# Altium footprint library LimeMicroAltiumLib.PcbLib: 876 footprints (part 15 of 57)
Each footprint in its own frame and in the unit in brackets; x right, y up, seen from the top. Pads: shape width x height; smd on the part's side, far side on the other; paste and mask are expansions set on the pad; w line width, h text height; cw(c..) or ccw(c..) is an arc to the next point about the centre after c.
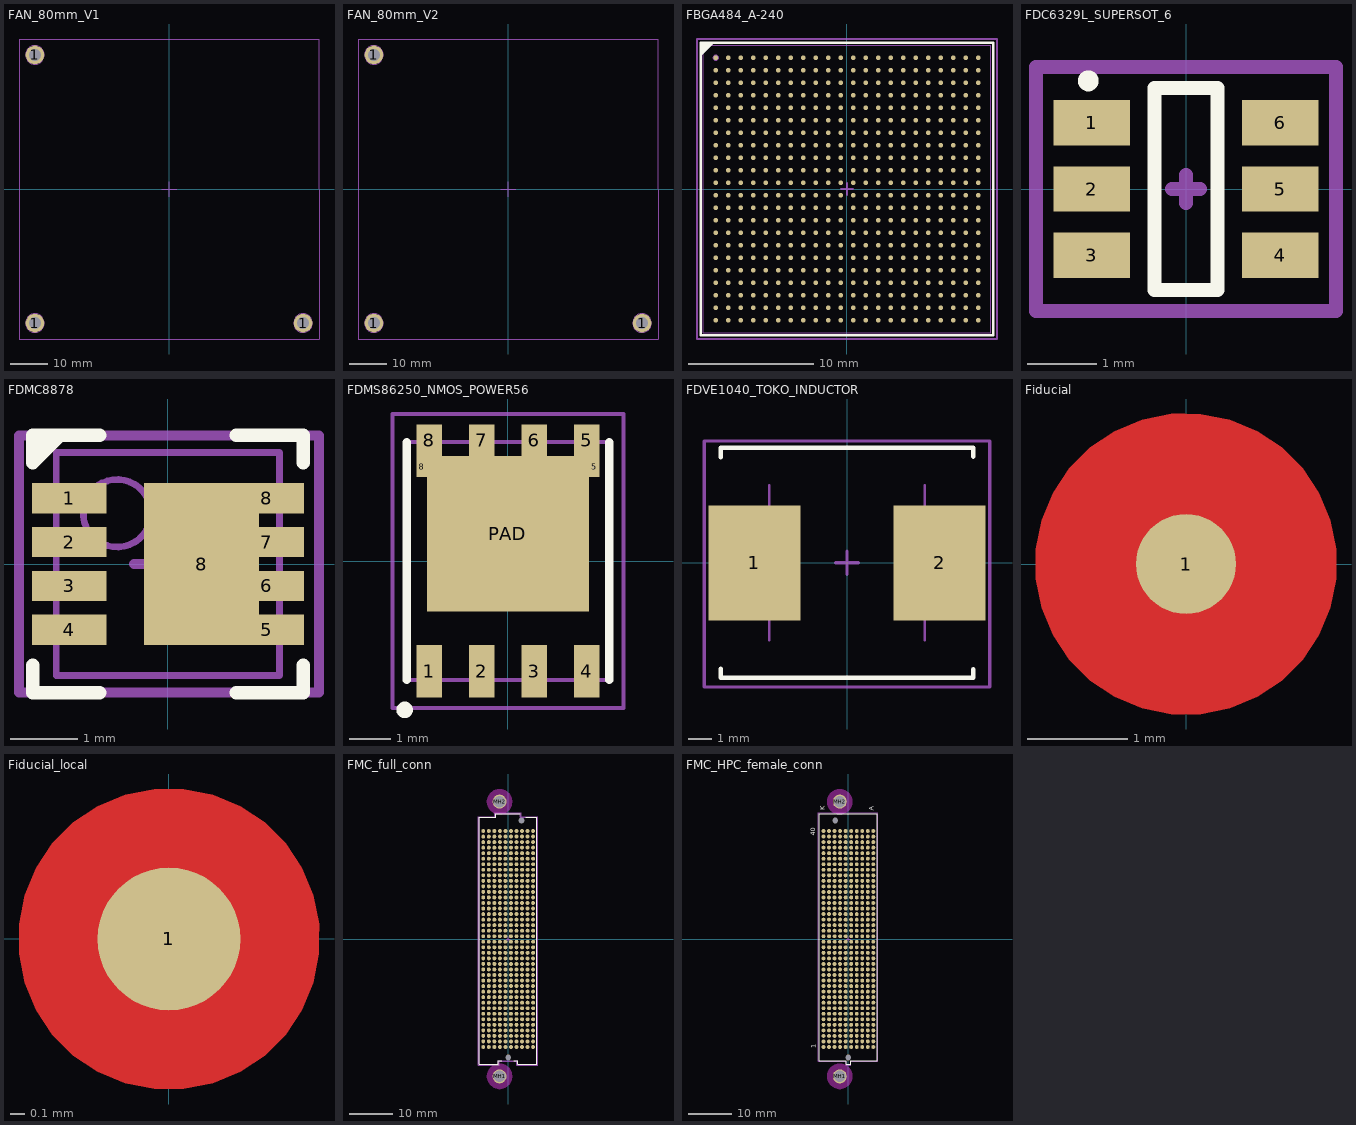
[diagram p14: the footprints below, top view; thin cyan lines are the x and y axes]

## FAN_80mm_V1 [mm]
height 20
pads (3):
  round 5 hole 3.2 mask+0.05: 1(-35.75,-35.75) 1(-35.75,35.75) 1(35.75,-35.75)
Mechanical 1:
  circle w0.25: c35.75,-35.75 r1.6
  circle w0.25: c35.75,-35.75 r2.5
  circle w0.25: c-35.75,35.75 r1.6
  circle w0.25: c-35.75,35.75 r2.5
  circle w0.25: c-35.75,-35.75 r2.5
  circle w0.25: c-35.75,-35.75 r1.6
Mechanical 15:
  circle w0.25: c-35.75,-35.75 r2.5
  circle w0.25: c-35.75,-35.75 r1.6
  circle w0.25: c-35.75,35.75 r2.5
  circle w0.25: c-35.75,35.75 r1.6
  circle w0.25: c35.75,-35.75 r2.5
  circle w0.25: c35.75,-35.75 r1.6
  lines w0.15: -2,0 0,0 ; 0,-2 0,0 ; 0,2 0,0 ; 2,0 0,0
  lines w0.3: -40,-40 -40,40 40,40 40,-40 -40,-40
  text ".Designator" at 0,0 h0.55
  text "FAN" at -3,-38 h1.5
3D body: height 15, standoff 0, extent 33.75,-37.75 37.75,-33.75
3D body: height 15, standoff 0, extent -37.75,-37.75 -33.75,-33.75
3D body: height 15, standoff 0, extent -37.75,33.75 -33.75,37.75
3D body "fan_me80201v3-000u-a99.stp": height 30, standoff 10, extent -66.338,-40 40,40

## FAN_80mm_V2 [mm]
height 20
pads (3):
  round 5 hole 3.2 mask+0.05: 1(-35.75,-35.75) 1(-35.75,35.75) 1(35.75,-35.75)
Mechanical 1:
  circle w0.25: c-35.75,-35.75 r1.6
  circle w0.25: c-35.75,-35.75 r2.5
  circle w0.25: c-35.75,35.75 r2.5
  circle w0.25: c-35.75,35.75 r1.6
  circle w0.25: c35.75,-35.75 r2.5
  circle w0.25: c35.75,-35.75 r1.6
Mechanical 15:
  circle w0.25: c35.75,-35.75 r1.6
  circle w0.25: c35.75,-35.75 r2.5
  circle w0.25: c-35.75,35.75 r1.6
  circle w0.25: c-35.75,35.75 r2.5
  circle w0.25: c-35.75,-35.75 r1.6
  circle w0.25: c-35.75,-35.75 r2.5
  lines w0.15: -2,0 0,0 ; 0,-2 0,0 ; 0,2 0,0 ; 2,0 0,0
  lines w0.3: -40,-40 40,-40 40,40 -40,40 -40,-40
  text "FAN" at -3,-38 h1.5
  text ".Designator" at 0,0 h0.55
3D body "fan_me80201v3-000u-a99.stp": height 36, standoff 16, extent -66.338,-40 40,40
3D body: height 15, standoff 0, extent -37.75,33.75 -33.75,37.75
3D body: height 15, standoff 0, extent -37.75,-37.75 -33.75,-33.75
3D body: height 15, standoff 0, extent 33.75,-37.75 37.75,-33.75

## FBGA484_A-240 [mm] "BGA, 484-Leads, Body 23x23mm, Pitch 1mm"
height 2.4
pads (484):
  round 0.38 smd: A1(-10.5,10.5) A2(-9.5,10.5) A3(-8.5,10.5) A4(-7.5,10.5) A5(-6.5,10.5) A6(-5.5,10.5) A7(-4.5,10.5) A8(-3.5,10.5) A9(-2.5,10.5) A10(-1.5,10.5) A11(-0.5,10.5) A12(0.5,10.5) A13(1.5,10.5) A14(2.5,10.5) A15(3.5,10.5) A16(4.5,10.5) A17(5.5,10.5) A18(6.5,10.5) A19(7.5,10.5) A20(8.5,10.5) A21(9.5,10.5) A22(10.5,10.5) AA1(-10.5,-9.5) AA2(-9.5,-9.5) AA3(-8.5,-9.5) AA4(-7.5,-9.5) AA5(-6.5,-9.5) AA6(-5.5,-9.5) AA7(-4.5,-9.5) AA8(-3.5,-9.5) AA9(-2.5,-9.5) AA10(-1.5,-9.5) AA11(-0.5,-9.5) AA12(0.5,-9.5) AA13(1.5,-9.5) AA14(2.5,-9.5) AA15(3.5,-9.5) AA16(4.5,-9.5) AA17(5.5,-9.5) AA18(6.5,-9.5) AA19(7.5,-9.5) AA20(8.5,-9.5) AA21(9.5,-9.5) AA22(10.5,-9.5) AB1(-10.5,-10.5) AB2(-9.5,-10.5) AB3(-8.5,-10.5) AB4(-7.5,-10.5) AB5(-6.5,-10.5) AB6(-5.5,-10.5) AB7(-4.5,-10.5) AB8(-3.5,-10.5) AB9(-2.5,-10.5) AB10(-1.5,-10.5) AB11(-0.5,-10.5) AB12(0.5,-10.5) AB13(1.5,-10.5) AB14(2.5,-10.5) AB15(3.5,-10.5) AB16(4.5,-10.5) AB17(5.5,-10.5) AB18(6.5,-10.5) AB19(7.5,-10.5) AB20(8.5,-10.5) AB21(9.5,-10.5) AB22(10.5,-10.5) B1(-10.5,9.5) B2(-9.5,9.5) B3(-8.5,9.5) B4(-7.5,9.5) B5(-6.5,9.5) B6(-5.5,9.5) B7(-4.5,9.5) B8(-3.5,9.5) B9(-2.5,9.5) B10(-1.5,9.5) B11(-0.5,9.5) B12(0.5,9.5) B13(1.5,9.5) B14(2.5,9.5) B15(3.5,9.5) B16(4.5,9.5) B17(5.5,9.5) B18(6.5,9.5) B19(7.5,9.5) B20(8.5,9.5) B21(9.5,9.5) B22(10.5,9.5) C1(-10.5,8.5) C2(-9.5,8.5) C3(-8.5,8.5) C4(-7.5,8.5) C5(-6.5,8.5) C6(-5.5,8.5) C7(-4.5,8.5) C8(-3.5,8.5) C9(-2.5,8.5) C10(-1.5,8.5) C11(-0.5,8.5) C12(0.5,8.5) C13(1.5,8.5) C14(2.5,8.5) C15(3.5,8.5) C16(4.5,8.5) C17(5.5,8.5) C18(6.5,8.5) C19(7.5,8.5) C20(8.5,8.5) C21(9.5,8.5) C22(10.5,8.5) D1(-10.5,7.5) D2(-9.5,7.5) D3(-8.5,7.5) D4(-7.5,7.5) D5(-6.5,7.5) D6(-5.5,7.5) D7(-4.5,7.5) D8(-3.5,7.5) D9(-2.5,7.5) D10(-1.5,7.5) D11(-0.5,7.5) D12(0.5,7.5) D13(1.5,7.5) D14(2.5,7.5) D15(3.5,7.5) D16(4.5,7.5) D17(5.5,7.5) D18(6.5,7.5) D19(7.5,7.5) D20(8.5,7.5) D21(9.5,7.5) D22(10.5,7.5) E1(-10.5,6.5) E2(-9.5,6.5) E3(-8.5,6.5) E4(-7.5,6.5) E5(-6.5,6.5) E6(-5.5,6.5) E7(-4.5,6.5) E8(-3.5,6.5) E9(-2.5,6.5) E10(-1.5,6.5) E11(-0.5,6.5) E12(0.5,6.5) E13(1.5,6.5) E14(2.5,6.5) E15(3.5,6.5) E16(4.5,6.5) E17(5.5,6.5) E18(6.5,6.5) E19(7.5,6.5) E20(8.5,6.5) E21(9.5,6.5) E22(10.5,6.5) F1(-10.5,5.5) F2(-9.5,5.5) F3(-8.5,5.5) F4(-7.5,5.5) F5(-6.5,5.5) F6(-5.5,5.5) F7(-4.5,5.5) F8(-3.5,5.5) F9(-2.5,5.5) F10(-1.5,5.5) F11(-0.5,5.5) F12(0.5,5.5) F13(1.5,5.5) F14(2.5,5.5) F15(3.5,5.5) F16(4.5,5.5) F17(5.5,5.5) F18(6.5,5.5) F19(7.5,5.5) F20(8.5,5.5) F21(9.5,5.5) F22(10.5,5.5) G1(-10.5,4.5) G2(-9.5,4.5) G3(-8.5,4.5) G4(-7.5,4.5) G5(-6.5,4.5) G6(-5.5,4.5) G7(-4.5,4.5) G8(-3.5,4.5) G9(-2.5,4.5) G10(-1.5,4.5) G11(-0.5,4.5) G12(0.5,4.5) G13(1.5,4.5) G14(2.5,4.5) G15(3.5,4.5) G16(4.5,4.5) G17(5.5,4.5) G18(6.5,4.5) G19(7.5,4.5) G20(8.5,4.5) G21(9.5,4.5) G22(10.5,4.5) H1(-10.5,3.5) H2(-9.5,3.5) H3(-8.5,3.5) H4(-7.5,3.5) H5(-6.5,3.5) H6(-5.5,3.5) H7(-4.5,3.5) H8(-3.5,3.5) H9(-2.5,3.5) H10(-1.5,3.5) H11(-0.5,3.5) H12(0.5,3.5) H13(1.5,3.5) H14(2.5,3.5) H15(3.5,3.5) H16(4.5,3.5) H17(5.5,3.5) H18(6.5,3.5) H19(7.5,3.5) H20(8.5,3.5) H21(9.5,3.5) H22(10.5,3.5) J1(-10.5,2.5) J2(-9.5,2.5) J3(-8.5,2.5) J4(-7.5,2.5) J5(-6.5,2.5) J6(-5.5,2.5) J7(-4.5,2.5) J8(-3.5,2.5) J9(-2.5,2.5) J10(-1.5,2.5) J11(-0.5,2.5) J12(0.5,2.5) J13(1.5,2.5) J14(2.5,2.5) J15(3.5,2.5) J16(4.5,2.5) J17(5.5,2.5) J18(6.5,2.5) J19(7.5,2.5) J20(8.5,2.5) J21(9.5,2.5) J22(10.5,2.5) K1(-10.5,1.5) K2(-9.5,1.5) K3(-8.5,1.5) K4(-7.5,1.5) K5(-6.5,1.5) K6(-5.5,1.5) K7(-4.5,1.5) K8(-3.5,1.5) K9(-2.5,1.5) K10(-1.5,1.5) K11(-0.5,1.5) K12(0.5,1.5) K13(1.5,1.5) K14(2.5,1.5) K15(3.5,1.5) K16(4.5,1.5) K17(5.5,1.5) K18(6.5,1.5) K19(7.5,1.5) K20(8.5,1.5) K21(9.5,1.5) K22(10.5,1.5) L1(-10.5,0.5) L2(-9.5,0.5) L3(-8.5,0.5) L4(-7.5,0.5) L5(-6.5,0.5) L6(-5.5,0.5) L7(-4.5,0.5) L8(-3.5,0.5) L9(-2.5,0.5) L10(-1.5,0.5) L11(-0.5,0.5) L12(0.5,0.5) L13(1.5,0.5) L14(2.5,0.5) L15(3.5,0.5) L16(4.5,0.5) L17(5.5,0.5) L18(6.5,0.5) L19(7.5,0.5) L20(8.5,0.5) L21(9.5,0.5) L22(10.5,0.5) M1(-10.5,-0.5) M2(-9.5,-0.5) M3(-8.5,-0.5) M4(-7.5,-0.5) M5(-6.5,-0.5) M6(-5.5,-0.5) M7(-4.5,-0.5) M8(-3.5,-0.5) M9(-2.5,-0.5) M10(-1.5,-0.5) M11(-0.5,-0.5) M12(0.5,-0.5) M13(1.5,-0.5) M14(2.5,-0.5) M15(3.5,-0.5) M16(4.5,-0.5) M17(5.5,-0.5) M18(6.5,-0.5) M19(7.5,-0.5) M20(8.5,-0.5) M21(9.5,-0.5) M22(10.5,-0.5) N1(-10.5,-1.5) N2(-9.5,-1.5) N3(-8.5,-1.5) N4(-7.5,-1.5) N5(-6.5,-1.5) N6(-5.5,-1.5) N7(-4.5,-1.5) N8(-3.5,-1.5) N9(-2.5,-1.5) N10(-1.5,-1.5) N11(-0.5,-1.5) N12(0.5,-1.5) N13(1.5,-1.5) N14(2.5,-1.5) N15(3.5,-1.5) N16(4.5,-1.5) N17(5.5,-1.5) N18(6.5,-1.5) N19(7.5,-1.5) N20(8.5,-1.5) N21(9.5,-1.5) N22(10.5,-1.5) P1(-10.5,-2.5) P2(-9.5,-2.5) P3(-8.5,-2.5) P4(-7.5,-2.5) P5(-6.5,-2.5) P6(-5.5,-2.5) P7(-4.5,-2.5) P8(-3.5,-2.5) P9(-2.5,-2.5) P10(-1.5,-2.5) P11(-0.5,-2.5) P12(0.5,-2.5) P13(1.5,-2.5) P14(2.5,-2.5) P15(3.5,-2.5) P16(4.5,-2.5) P17(5.5,-2.5) P18(6.5,-2.5) P19(7.5,-2.5) P20(8.5,-2.5) P21(9.5,-2.5) P22(10.5,-2.5) R1(-10.5,-3.5) R2(-9.5,-3.5) R3(-8.5,-3.5) R4(-7.5,-3.5) R5(-6.5,-3.5) R6(-5.5,-3.5) R7(-4.5,-3.5) R8(-3.5,-3.5) R9(-2.5,-3.5) R10(-1.5,-3.5) R11(-0.5,-3.5) R12(0.5,-3.5) R13(1.5,-3.5) R14(2.5,-3.5) R15(3.5,-3.5) R16(4.5,-3.5) R17(5.5,-3.5) R18(6.5,-3.5) R19(7.5,-3.5) R20(8.5,-3.5) R21(9.5,-3.5) R22(10.5,-3.5) T1(-10.5,-4.5) T2(-9.5,-4.5) T3(-8.5,-4.5) T4(-7.5,-4.5) T5(-6.5,-4.5) T6(-5.5,-4.5) T7(-4.5,-4.5) T8(-3.5,-4.5) T9(-2.5,-4.5) T10(-1.5,-4.5) T11(-0.5,-4.5) T12(0.5,-4.5) T13(1.5,-4.5) T14(2.5,-4.5) T15(3.5,-4.5) T16(4.5,-4.5) T17(5.5,-4.5) T18(6.5,-4.5) T19(7.5,-4.5) T20(8.5,-4.5) T21(9.5,-4.5) T22(10.5,-4.5) U1(-10.5,-5.5) U2(-9.5,-5.5) U3(-8.5,-5.5) U4(-7.5,-5.5) U5(-6.5,-5.5) U6(-5.5,-5.5) U7(-4.5,-5.5) U8(-3.5,-5.5) U9(-2.5,-5.5) U10(-1.5,-5.5) U11(-0.5,-5.5) U12(0.5,-5.5) U13(1.5,-5.5) U14(2.5,-5.5) U15(3.5,-5.5) U16(4.5,-5.5) U17(5.5,-5.5) U18(6.5,-5.5) U19(7.5,-5.5) U20(8.5,-5.5) U21(9.5,-5.5) U22(10.5,-5.5) V1(-10.5,-6.5) V2(-9.5,-6.5) V3(-8.5,-6.5) V4(-7.5,-6.5) V5(-6.5,-6.5) V6(-5.5,-6.5) V7(-4.5,-6.5) V8(-3.5,-6.5) V9(-2.5,-6.5) V10(-1.5,-6.5) V11(-0.5,-6.5) V12(0.5,-6.5) V13(1.5,-6.5) V14(2.5,-6.5) V15(3.5,-6.5) V16(4.5,-6.5) V17(5.5,-6.5) V18(6.5,-6.5) V19(7.5,-6.5) V20(8.5,-6.5) V21(9.5,-6.5) V22(10.5,-6.5) W1(-10.5,-7.5) W2(-9.5,-7.5) W3(-8.5,-7.5) W4(-7.5,-7.5) W5(-6.5,-7.5) W6(-5.5,-7.5) W7(-4.5,-7.5) W8(-3.5,-7.5) W9(-2.5,-7.5) W10(-1.5,-7.5) W11(-0.5,-7.5) W12(0.5,-7.5) W13(1.5,-7.5) W14(2.5,-7.5) W15(3.5,-7.5) W16(4.5,-7.5) W17(5.5,-7.5) W18(6.5,-7.5) W19(7.5,-7.5) W20(8.5,-7.5) W21(9.5,-7.5) W22(10.5,-7.5) Y1(-10.5,-8.5) Y2(-9.5,-8.5) Y3(-8.5,-8.5) Y4(-7.5,-8.5) Y5(-6.5,-8.5) Y6(-5.5,-8.5) Y7(-4.5,-8.5) Y8(-3.5,-8.5) Y9(-2.5,-8.5) Y10(-1.5,-8.5) Y11(-0.5,-8.5) Y12(0.5,-8.5) Y13(1.5,-8.5) Y14(2.5,-8.5) Y15(3.5,-8.5) Y16(4.5,-8.5) Y17(5.5,-8.5) Y18(6.5,-8.5) Y19(7.5,-8.5) Y20(8.5,-8.5) Y21(9.5,-8.5) Y22(10.5,-8.5)
Top Overlay:
  region: -10.7,11.7 -11.7,10.7 -11.7,11.7
  lines w0.2: -11.7,10.7 -10.7,11.7 ; -11.7,-11.7 -11.7,11.7 11.7,11.7 11.7,-11.7 -11.7,-11.7
Mechanical 13:
  lines w0.1: -11.5,-11.5 -11.5,11.5 11.5,11.5 11.5,-11.5 -11.5,-11.5
Mechanical 15:
  circle w0.25: c-10.5,10.5 r0.125
  lines w0.15: -0.5,0 0.5,0 ; 0,-0.5 0,0.5 ; -12,-12 -12,12 12,12 12,-12 -12,-12
  text ".Designator" at 0,0 h0.7
3D body: height 2.5, standoff 2.4, extent -10.9,10.1 -10.1,10.9
3D body: height 2.4, standoff 0.4, extent -11.5,-11.5 11.5,11.5

## FDC6329L_SUPERSOT_6 [mm]
pads (6):
  rect 1.1x0.65 smd: 1(-1.35,0.95) 2(-1.35,0) 3(-1.35,-0.95) 4(1.35,-0.95) 5(1.35,0) 6(1.35,0.95)
Top Overlay:
  circle w0.254: c-1.4,1.55 r0.022
  lines w0.2: -0.45,-1.45 0.45,-1.45 0.45,1.45 -0.45,1.45 -0.45,-1.45
Mechanical 15:
  circle w0.254: c-1.36,0.96 r0.045
  lines w0.2: -0.2,0 0,0 ; 0,-0.2 0,0.2 0,0 ; 0.2,0 0,0 ; -2.15,-1.75 -2.15,1.75 2.15,1.75 2.15,-1.75 -2.15,-1.75
  text ".Designator" at 0,0 h0.55
3D body "SuperSOT-6.stp": height 1, standoff 0, extent -1.4,-1.45 1.4,1.45

## FDMC8878 [mm] "SON, 8-Leads, Body 3,30x3,30mm, Pitch 0,65mm, Thermal Pad 1,20x0,75mm, IPC Medium Density"
height 0.8
pads (9):
  rect 1.1x0.45 smd mask+0.05: 1(-1.46,0.975) 2(-1.46,0.325) 3(-1.46,-0.325) 4(-1.46,-0.975)
  rect 1.1x0.45 smd: 5(1.46,-0.975) 6(1.46,-0.325) 7(1.46,0.325) 8(1.46,0.975)
  rect 1.7x2.4 smd: 8(0.5,0)
Top Overlay:
  region: -2,1.5 -2,1.9 -1.6,1.9
  lines w0.2: -2,-1.5 -2,-1.9 -1.01,-1.9 ; -1.6,1.9 -2,1.5 -2,1.9 -1.01,1.9 ; 1.01,-1.9 2,-1.9 2,-1.5 ; 1.01,1.9 2,1.9 2,1.5
Mechanical 13:
  circle w0.1: c-0.75,0.75 r0.5
  lines w0.1: -1.65,-1.65 1.65,-1.65 1.65,1.65 -1.65,1.65 -1.65,-1.65
Mechanical 15:
  circle w0.2: c-1.475,0.975 r0.079
  lines w0.15: -0.5,0 0.5,0 ; 0,-0.5 0,0.5 ; -2.2,-1.9 2.235,-1.9 2.235,1.9 -2.2,1.9 -2.2,-1.9
  text ".Designator" at 0,0 h0.55
3D body "User Library-MLP-3_3x3_3.STEP": height 0.8, standoff 0, extent -1.65,-1.65 1.65,1.65

## FDMS86250_NMOS_POWER56 [mm]
pads (11):
  rect 0.61x1.27 smd mask+0.05: 1(-1.905,-2.67) 2(-0.635,-2.67) 3(0.635,-2.67) 4(1.905,-2.67)
  rect 0.61x0.77 smd mask+0.05: 5(1.905,2.92) 6(0.635,2.92) 7(-0.635,2.92) 8(-1.905,2.92)
  rect 0.255x0.5 smd mask+0.05: 5(2.083,2.285) 8(-2.083,2.285)
  rect 3.91x3.75 smd mask+0.05: PAD(0,0.66)
Top Overlay:
  circle w0.2: c-2.5,-3.6 r0.1
  lines w0.2: -2.45,-2.875 -2.45,2.875 ; 2.45,-2.875 2.45,2.875
Mechanical 13:
  lines w0.1: -2.45,-2.875 2.45,-2.875 2.45,2.875 -2.45,2.875 -2.45,-2.875
Mechanical 15:
  circle w0.2: c-1.9,-2.8 r0.1
  lines w0.1: -2.794,-3.556 2.794,-3.556 2.794,3.556 -2.794,3.556 -2.794,-3.556
  lines w0.15: -0.5,0 0.5,0 ; 0,-0.5 0,0.5
  text ".Designator" at 0,0 h0.55
3D body "FDMS86250.stp": height 1.2, standoff 0, extent -2.45,-3.244 2.45,3.244

## FDVE1040_TOKO_INDUCTOR [mm] "Precision Wire Wound Inductor"
height 4
pads (2):
  rect 4x5 smd: 1(-4.025,0) 2(4.025,0)
Top Overlay:
  lines w0.2: -5.5,-4.6 -5.5,-5 -5.3,-5 5.5,-5 5.5,-4.625 ; -5.5,4.6 -5.5,5 -5.3,5 5.5,5 5.5,4.625
Mechanical 13:
  lines w0.1: -3.38,-4.98 3.38,-4.98 ; -3.38,-3.38 -3.38,3.38 ; -3.38,4.98 3.38,4.98 ; 3.38,-3.38 3.38,3.38
Mechanical 15:
  lines w0.15: -0.5,0 0.5,0 ; 0,-0.5 0,0.5 ; -6.2,-5.4 -6.2,5.3 6.2,5.3 6.2,-5.4 -6.2,-5.4
  text "no polarity" at -2.9,-2.4 h0.55
  text ".Designator" at 0,0 h0.55
3D body "SW3dPS-744325120.STEP": height 4.72, standoff -0.09, extent -5.55,-5.256 5.45,5.256

## Fiducial [mm]
pads (1):
  round 1 smd paste-1 mask+1: 1(0,0)
Top Layer:
  pour cut-out: 0,1.5 -0.148,1.5 -0.438,1.442 -0.711,1.329 -0.956,1.165 -1.165,0.956 -1.329,0.711 -1.442,0.438 -1.5,0.148 -1.5,0 -1.5,-0.148 -1.442,-0.438 -1.329,-0.711 -1.165,-0.956 -0.956,-1.165 -0.711,-1.329 -0.438,-1.442 -0.148,-1.5 0,-1.5 0.148,-1.5 0.438,-1.442 0.711,-1.329 0.956,-1.165 1.165,-0.956 1.329,-0.711 1.442,-0.438 1.5,-0.148 1.5,0 1.5,0.148 1.442,0.438 1.329,0.711 1.165,0.956 0.956,1.165 0.711,1.329 0.438,1.442 0.148,1.5
Mechanical 1:
  circle w0.6: c0,0 r0.2

## Fiducial_local [mm]
pads (1):
  round 1 smd paste-1 mask+0.5: 1(0,0)
Top Layer:
  pour cut-out: -1.05,0 -1.05,-0.103 -1.01,-0.306 -0.931,-0.497 -0.816,-0.669 -0.669,-0.816 -0.497,-0.931 -0.306,-1.01 -0.103,-1.05 0,-1.05 0.103,-1.05 0.306,-1.01 0.497,-0.931 0.669,-0.816 0.816,-0.669 0.931,-0.497 1.01,-0.306 1.05,-0.103 1.05,0 1.05,0.103 1.01,0.306 0.931,0.497 0.816,0.669 0.669,0.816 0.497,0.931 0.306,1.01 0.103,1.05 0,1.05 -0.103,1.05 -0.306,1.01 -0.497,0.931 -0.669,0.816 -0.816,0.669 -0.931,0.497 -1.01,0.306 -1.05,0.103
Mechanical 1:
  circle w0.6: c0,0 r0.2

## FMC_full_conn [mm]
pads (404):
  round 0.9 smd: A1(5.715,24.765) A2(5.715,23.495) A3(5.715,22.225) A4(5.715,20.955) A5(5.715,19.685) A6(5.715,18.415) A7(5.715,17.145) A8(5.715,15.875) A9(5.715,14.605) A10(5.715,13.335) A11(5.715,12.065) A12(5.715,10.795) A13(5.715,9.525) A14(5.715,8.255) A15(5.715,6.985) A16(5.715,5.715) A17(5.715,4.445) A18(5.715,3.175) A19(5.715,1.905) A20(5.715,0.635) A21(5.715,-0.635) A22(5.715,-1.905) A23(5.715,-3.175) A24(5.715,-4.445) A25(5.715,-5.715) A26(5.715,-6.985) A27(5.715,-8.255) A28(5.715,-9.525) A29(5.715,-10.795) A30(5.715,-12.065) A31(5.715,-13.335) A32(5.715,-14.605) A33(5.715,-15.875) A34(5.715,-17.145) A35(5.715,-18.415) A36(5.715,-19.685) A37(5.715,-20.955) A38(5.715,-22.225) A39(5.715,-23.495) A40(5.715,-24.765) B1(4.445,24.765) B2(4.445,23.495) B3(4.445,22.225) B4(4.445,20.955) B5(4.445,19.685) B6(4.445,18.415) B7(4.445,17.145) B8(4.445,15.875) B9(4.445,14.605) B10(4.445,13.335) B11(4.445,12.065) B12(4.445,10.795) B13(4.445,9.525) B14(4.445,8.255) B15(4.445,6.985) B16(4.445,5.715) B17(4.445,4.445) B18(4.445,3.175) B19(4.445,1.905) B20(4.445,0.635) B21(4.445,-0.635) B22(4.445,-1.905) B23(4.445,-3.175) B24(4.445,-4.445) B25(4.445,-5.715) B26(4.445,-6.985) B27(4.445,-8.255) B28(4.445,-9.525) B29(4.445,-10.795) B30(4.445,-12.065) B31(4.445,-13.335) B32(4.445,-14.605) B33(4.445,-15.875) B34(4.445,-17.145) B35(4.445,-18.415) B36(4.445,-19.685) B37(4.445,-20.955) B38(4.445,-22.225) B39(4.445,-23.495) B40(4.445,-24.765) C1(3.175,24.765) C2(3.175,23.495) C3(3.175,22.225) C4(3.175,20.955) C5(3.175,19.685) C6(3.175,18.415) C7(3.175,17.145) C8(3.175,15.875) C9(3.175,14.605) C10(3.175,13.335) C11(3.175,12.065) C12(3.175,10.795) C13(3.175,9.525) C14(3.175,8.255) C15(3.175,6.985) C16(3.175,5.715) C17(3.175,4.445) C18(3.175,3.175) C19(3.175,1.905) C20(3.175,0.635) C21(3.175,-0.635) C22(3.175,-1.905) C23(3.175,-3.175) C24(3.175,-4.445) C25(3.175,-5.715) C26(3.175,-6.985) C27(3.175,-8.255) C28(3.175,-9.525) C29(3.175,-10.795) C30(3.175,-12.065) C31(3.175,-13.335) C32(3.175,-14.605) C33(3.175,-15.875) C34(3.175,-17.145) C35(3.175,-18.415) C36(3.175,-19.685) C37(3.175,-20.955) C38(3.175,-22.225) C39(3.175,-23.495) C40(3.175,-24.765) D1(1.905,24.765) D2(1.905,23.495) D3(1.905,22.225) D4(1.905,20.955) D5(1.905,19.685) D6(1.905,18.415) D7(1.905,17.145) D8(1.905,15.875) D9(1.905,14.605) D10(1.905,13.335) D11(1.905,12.065) D12(1.905,10.795) D13(1.905,9.525) D14(1.905,8.255) D15(1.905,6.985) D16(1.905,5.715) D17(1.905,4.445) D18(1.905,3.175) D19(1.905,1.905) D20(1.905,0.635) D21(1.905,-0.635) D22(1.905,-1.905) D23(1.905,-3.175) D24(1.905,-4.445) D25(1.905,-5.715) D26(1.905,-6.985) D27(1.905,-8.255) D28(1.905,-9.525) D29(1.905,-10.795) D30(1.905,-12.065) D31(1.905,-13.335) D32(1.905,-14.605) D33(1.905,-15.875) D34(1.905,-17.145) D35(1.905,-18.415) D36(1.905,-19.685) D37(1.905,-20.955) D38(1.905,-22.225) D39(1.905,-23.495) D40(1.905,-24.765) E1(0.635,24.765) E2(0.635,23.495) E3(0.635,22.225) E4(0.635,20.955) E5(0.635,19.685) E6(0.635,18.415) E7(0.635,17.145) E8(0.635,15.875) E9(0.635,14.605) E10(0.635,13.335) E11(0.635,12.065) E12(0.635,10.795) E13(0.635,9.525) E14(0.635,8.255) E15(0.635,6.985) E16(0.635,5.715) E17(0.635,4.445) E18(0.635,3.175) E19(0.635,1.905) E20(0.635,0.635) E21(0.635,-0.635) E22(0.635,-1.905) E23(0.635,-3.175) E24(0.635,-4.445) E25(0.635,-5.715) E26(0.635,-6.985) E27(0.635,-8.255) E28(0.635,-9.525) E29(0.635,-10.795) E30(0.635,-12.065) E31(0.635,-13.335) E32(0.635,-14.605) E33(0.635,-15.875) E34(0.635,-17.145) E35(0.635,-18.415) E36(0.635,-19.685) E37(0.635,-20.955) E38(0.635,-22.225) E39(0.635,-23.495) E40(0.635,-24.765) F1(-0.635,24.765) F2(-0.635,23.495) F3(-0.635,22.225) F4(-0.635,20.955) F5(-0.635,19.685) F6(-0.635,18.415) F7(-0.635,17.145) F8(-0.635,15.875) F9(-0.635,14.605) F10(-0.635,13.335) F11(-0.635,12.065) F12(-0.635,10.795) F13(-0.635,9.525) F14(-0.635,8.255) F15(-0.635,6.985) F16(-0.635,5.715) F17(-0.635,4.445) F18(-0.635,3.175) F19(-0.635,1.905) F20(-0.635,0.635) F21(-0.635,-0.635) F22(-0.635,-1.905) F23(-0.635,-3.175) F24(-0.635,-4.445) F25(-0.635,-5.715) F26(-0.635,-6.985) F27(-0.635,-8.255) F28(-0.635,-9.525) F29(-0.635,-10.795) F30(-0.635,-12.065) F31(-0.635,-13.335) F32(-0.635,-14.605) F33(-0.635,-15.875) F34(-0.635,-17.145) F35(-0.635,-18.415) F36(-0.635,-19.685) F37(-0.635,-20.955) F38(-0.635,-22.225) F39(-0.635,-23.495) F40(-0.635,-24.765) G1(-1.905,24.765) G2(-1.905,23.495) G3(-1.905,22.225) G4(-1.905,20.955) G5(-1.905,19.685) G6(-1.905,18.415) G7(-1.905,17.145) G8(-1.905,15.875) G9(-1.905,14.605) G10(-1.905,13.335) G11(-1.905,12.065) G12(-1.905,10.795) G13(-1.905,9.525) G14(-1.905,8.255) G15(-1.905,6.985) G16(-1.905,5.715) G17(-1.905,4.445) G18(-1.905,3.175) G19(-1.905,1.905) G20(-1.905,0.635) G21(-1.905,-0.635) G22(-1.905,-1.905) G23(-1.905,-3.175) G24(-1.905,-4.445) G25(-1.905,-5.715) G26(-1.905,-6.985) G27(-1.905,-8.255) G28(-1.905,-9.525) G29(-1.905,-10.795) G30(-1.905,-12.065) G31(-1.905,-13.335) G32(-1.905,-14.605) G33(-1.905,-15.875) G34(-1.905,-17.145) G35(-1.905,-18.415) G36(-1.905,-19.685) G37(-1.905,-20.955) G38(-1.905,-22.225) G39(-1.905,-23.495) G40(-1.905,-24.765) H1(-3.175,24.765) H2(-3.175,23.495) H3(-3.175,22.225) H4(-3.175,20.955) H5(-3.175,19.685) H6(-3.175,18.415) H7(-3.175,17.145) H8(-3.175,15.875) H9(-3.175,14.605) H10(-3.175,13.335) H11(-3.175,12.065) H12(-3.175,10.795) H13(-3.175,9.525) H14(-3.175,8.255) H15(-3.175,6.985) H16(-3.175,5.715) H17(-3.175,4.445) H18(-3.175,3.175) H19(-3.175,1.905) H20(-3.175,0.635) H21(-3.175,-0.635) H22(-3.175,-1.905) H23(-3.175,-3.175) H24(-3.175,-4.445) H25(-3.175,-5.715) H26(-3.175,-6.985) H27(-3.175,-8.255) H28(-3.175,-9.525) H29(-3.175,-10.795) H30(-3.175,-12.065) H31(-3.175,-13.335) H32(-3.175,-14.605) H33(-3.175,-15.875) H34(-3.175,-17.145) H35(-3.175,-18.415) H36(-3.175,-19.685) H37(-3.175,-20.955) H38(-3.175,-22.225) H39(-3.175,-23.495) H40(-3.175,-24.765) J1(-4.445,24.765) J2(-4.445,23.495) J3(-4.445,22.225) J4(-4.445,20.955) J5(-4.445,19.685) J6(-4.445,18.415) J7(-4.445,17.145) J8(-4.445,15.875) J9(-4.445,14.605) J10(-4.445,13.335) J11(-4.445,12.065) J12(-4.445,10.795) J13(-4.445,9.525) J14(-4.445,8.255) J15(-4.445,6.985) J16(-4.445,5.715) J17(-4.445,4.445) J18(-4.445,3.175) J19(-4.445,1.905) J20(-4.445,0.635) J21(-4.445,-0.635) J22(-4.445,-1.905) J23(-4.445,-3.175) J24(-4.445,-4.445) J25(-4.445,-5.715) J26(-4.445,-6.985) J27(-4.445,-8.255) J28(-4.445,-9.525) J29(-4.445,-10.795) J30(-4.445,-12.065) J31(-4.445,-13.335) J32(-4.445,-14.605) J33(-4.445,-15.875) J34(-4.445,-17.145) J35(-4.445,-18.415) J36(-4.445,-19.685) J37(-4.445,-20.955) J38(-4.445,-22.225) J39(-4.445,-23.495) J40(-4.445,-24.765) K1(-5.715,24.765) K2(-5.715,23.495) K3(-5.715,22.225) K4(-5.715,20.955) K5(-5.715,19.685) K6(-5.715,18.415) K7(-5.715,17.145) K8(-5.715,15.875) K9(-5.715,14.605) K10(-5.715,13.335) K11(-5.715,12.065) K12(-5.715,10.795) K13(-5.715,9.525) K14(-5.715,8.255) K15(-5.715,6.985) K16(-5.715,5.715) K17(-5.715,4.445) K18(-5.715,3.175) K19(-5.715,1.905) K20(-5.715,0.635) K21(-5.715,-0.635) K22(-5.715,-1.905) K23(-5.715,-3.175) K24(-5.715,-4.445) K25(-5.715,-5.715) K26(-5.715,-6.985) K27(-5.715,-8.255) K28(-5.715,-9.525) K29(-5.715,-10.795) K30(-5.715,-12.065) K31(-5.715,-13.335) K32(-5.715,-14.605) K33(-5.715,-15.875) K34(-5.715,-17.145) K35(-5.715,-18.415) K36(-5.715,-19.685) K37(-5.715,-20.955) K38(-5.715,-22.225) K39(-5.715,-23.495) K40(-5.715,-24.765)
  round 3.2 hole 2.7: MH1(-1.98,-31.5) MH2(-1.98,31.5)
  round 0.97 hole 1.27 unplated: MH1(0,-27.18) MH2(3.05,27.18)
Top Layer keep-out:
  region: -1.98,-34.4 -2.17,-34.4 -2.547,-34.35 -2.914,-34.252 -3.265,-34.107 -3.595,-33.916 -3.896,-33.685 -4.165,-33.416 -4.396,-33.115 -4.587,-32.785 -4.732,-32.434 -4.83,-32.067 -4.88,-31.69 -4.88,-31.5 -4.88,-31.31 -4.83,-30.933 -4.732,-30.566 -4.587,-30.215 -4.396,-29.885 -4.165,-29.584 -3.896,-29.315 -3.595,-29.084 -3.265,-28.893 -2.914,-28.748 -2.547,-28.65 -2.17,-28.6 -1.98,-28.6 -1.79,-28.6 -1.413,-28.65 -1.046,-28.748 -0.695,-28.893 -0.365,-29.084 -0.064,-29.315 0.205,-29.584 0.436,-29.885 0.627,-30.215 0.772,-30.566 0.87,-30.933 0.92,-31.31 0.92,-31.5 0.92,-31.69 0.87,-32.067 0.772,-32.434 0.627,-32.785 0.436,-33.115 0.205,-33.416 -0.064,-33.685 -0.365,-33.916 -0.695,-34.107 -1.046,-34.252 -1.413,-34.35 -1.79,-34.4
  region: -1.98,28.6 -2.17,28.6 -2.547,28.65 -2.914,28.748 -3.265,28.893 -3.595,29.084 -3.896,29.315 -4.165,29.584 -4.396,29.885 -4.587,30.215 -4.732,30.566 -4.83,30.933 -4.88,31.31 -4.88,31.5 -4.88,31.69 -4.83,32.067 -4.732,32.434 -4.587,32.785 -4.396,33.115 -4.165,33.416 -3.896,33.685 -3.595,33.916 -3.265,34.107 -2.914,34.252 -2.547,34.35 -2.17,34.4 -1.98,34.4 -1.79,34.4 -1.413,34.35 -1.046,34.252 -0.695,34.107 -0.365,33.916 -0.064,33.685 0.205,33.416 0.436,33.115 0.627,32.785 0.772,32.434 0.87,32.067 0.92,31.69 0.92,31.5 0.92,31.31 0.87,30.933 0.772,30.566 0.627,30.215 0.436,29.885 0.205,29.584 -0.064,29.315 -0.365,29.084 -0.695,28.893 -1.046,28.748 -1.413,28.65 -1.79,28.6
Top Overlay:
  lines w0.2: -6.662,-28.727 -6.662,27.89 ; -6.66,-28.727 -2.241,-28.727 -2.241,-27.889 -1.5,-27.889 ; -6.66,27.889 -2.888,27.889 -2.888,28.727 2.801,28.727 ; 1.25,-27.889 2.153,-27.889 2.153,-28.727 6.574,-28.727 ; 4,27.889 6.573,27.889 6.573,-28.727
Mechanical 13:
  lines w0.1: -6.662,-28.727 -6.662,27.89 ; -6.66,-28.727 -2.241,-28.727 -2.241,-27.889 2.153,-27.889 2.153,-28.727 6.574,-28.727 ; -6.66,27.889 -2.888,27.889 -2.888,28.727 2.801,28.727 2.801,27.889 6.573,27.889 6.573,-28.727
Mechanical 15:
  lines w0.15: -0.5,0 0.5,0 ; 0,-0.5 0,0.5 ; -6.862,-28.927 -2.041,-28.927 -2.041,-28.089 1.953,-28.089 1.953,-28.927 6.773,-28.927 6.773,28.089 3.001,28.089 3.001,28.927 -3.088,28.927 -3.088,28.089 -6.862,28.089 -6.862,-28.927
  text ".Designator" at -0.1,0 h0.55
3D body: height 2, standoff 0.25, extent -0.806,-27.889 0.718,-26.492
3D body: height 0.73, standoff -1.27, extent -0.61,-27.736 0.508,-26.62
3D body: height 6.24, standoff 2.16, extent 3.697,-25.019 3.836,25.019
3D body: height 6.55, standoff 2.16, extent 3.281,25.019 4.252,25.502
3D body: height 6.55, standoff 2.16, extent 3.281,23.749 4.252,24.511
3D body: height 6.55, standoff 2.16, extent 3.281,22.479 4.252,23.241
3D body: height 6.55, standoff 2.16, extent 3.281,21.209 4.252,21.971
3D body: height 6.55, standoff 2.16, extent 3.281,19.939 4.252,20.701
3D body: height 6.55, standoff 2.16, extent 3.281,18.669 4.252,19.431
3D body: height 6.55, standoff 2.16, extent 3.281,17.399 4.252,18.161
3D body: height 6.55, standoff 2.16, extent 3.281,16.129 4.252,16.891
3D body: height 6.55, standoff 2.16, extent 3.281,14.859 4.252,15.621
3D body: height 6.55, standoff 2.16, extent 3.281,13.589 4.252,14.351
3D body: height 6.55, standoff 2.16, extent 3.281,12.319 4.252,13.081
3D body: height 6.55, standoff 2.16, extent 3.281,11.049 4.252,11.811
3D body: height 6.55, standoff 2.16, extent 3.281,9.779 4.252,10.541
3D body: height 6.55, standoff 2.16, extent 3.281,8.509 4.252,9.271
3D body: height 6.55, standoff 2.16, extent 3.281,7.239 4.252,8.001
3D body: height 6.55, standoff 2.16, extent 3.281,5.969 4.252,6.731
3D body: height 6.55, standoff 2.16, extent 3.281,4.699 4.252,5.461
3D body: height 6.55, standoff 2.16, extent 3.281,3.429 4.252,4.191
3D body: height 6.55, standoff 2.16, extent 3.281,2.159 4.252,2.921
3D body: height 6.55, standoff 2.16, extent 3.281,0.889 4.252,1.651
3D body: height 6.55, standoff 2.16, extent 3.281,-0.381 4.252,0.381
3D body: height 6.55, standoff 2.16, extent 3.281,-1.651 4.252,-0.889
3D body: height 6.55, standoff 2.16, extent 3.281,-2.921 4.252,-2.159
3D body: height 6.55, standoff 2.16, extent 3.281,-4.191 4.252,-3.429
3D body: height 6.55, standoff 2.16, extent 3.281,-5.461 4.252,-4.699
3D body: height 6.55, standoff 2.16, extent 3.281,-6.731 4.252,-5.969
3D body: height 6.55, standoff 2.16, extent 3.281,-8.001 4.252,-7.239
3D body: height 6.55, standoff 2.16, extent 3.281,-9.271 4.252,-8.509
3D body: height 6.55, standoff 2.16, extent 3.281,-10.541 4.252,-9.779
3D body: height 6.55, standoff 2.16, extent 3.281,-11.811 4.252,-11.049
3D body: height 6.55, standoff 2.16, extent 3.281,-13.081 4.252,-12.319
3D body: height 6.55, standoff 2.16, extent 3.281,-14.351 4.252,-13.589
3D body: height 6.55, standoff 2.16, extent 3.281,-15.621 4.252,-14.859
3D body: height 6.55, standoff 2.16, extent 3.281,-16.891 4.252,-16.129
3D body: height 6.55, standoff 2.16, extent 3.281,-18.161 4.252,-17.399
3D body: height 6.55, standoff 2.16, extent 3.281,-19.431 4.252,-18.669
3D body: height 6.55, standoff 2.16, extent 3.281,-20.701 4.252,-19.939
3D body: height 6.55, standoff 2.16, extent 3.281,-21.971 4.252,-21.209
3D body: height 6.55, standoff 2.16, extent 3.281,-23.241 4.252,-22.479
3D body: height 6.55, standoff 2.16, extent 3.281,-24.511 4.252,-23.749
3D body: height 2, standoff 0.51, extent -5.771,26.493 -3.853,27.255
3D body: height 2, standoff 0.51, extent 3.766,26.492 5.685,27.254
3D body: height 2, standoff 0, extent -3.854,26.492 -2.33,27.889
3D body: height 2, standoff 0, extent -0.806,26.492 0.718,27.889
3D body: height 2, standoff 0.25, extent 2.242,26.492 3.766,27.889
3D body: height 6.55, standoff 1.92, extent -6.662,27.053 6.571,28.729
3D body: height 2, standoff 0.51, extent -6.279,-27.889 5.684,-26.492
3D body: height 6.55, standoff 0, extent 5.685,-27.889 6.573,-26.493
3D body: height 2, standoff 0, extent 2.242,-27.889 3.766,-26.492
3D body: height 2, standoff 0, extent -3.854,-27.889 -2.33,-26.492
3D body: height 6.55, standoff 0, extent -6.66,-27.889 -5.772,-26.493
3D body: height 6.55, standoff 1.92, extent -6.659,-28.727 6.574,-27.052
3D body: height 6.55, standoff 0, extent 5.685,26.493 6.573,27.889
3D body: height 6.55, standoff 0, extent -6.662,26.494 -5.774,27.89
3D body: height 2, standoff 0.51, extent -3.854,26.492 3.766,27.889
3D body: height 6.55, standoff 2.16, extent 3.281,-25.502 4.252,-25.019
3D body: height 6.55, standoff 2.16, extent 0.741,-25.502 1.712,-25.019
3D body: height 6.55, standoff 2.16, extent 0.741,-24.511 1.712,-23.749
3D body: height 6.55, standoff 2.16, extent 0.741,-23.241 1.712,-22.479
3D body: height 6.55, standoff 2.16, extent 0.741,-21.971 1.712,-21.209
3D body: height 6.55, standoff 2.16, extent 0.741,-20.701 1.712,-19.939
3D body: height 6.55, standoff 2.16, extent 0.741,-19.431 1.712,-18.669
3D body: height 6.55, standoff 2.16, extent 0.741,-18.161 1.712,-17.399
3D body: height 6.55, standoff 2.16, extent 0.741,-16.891 1.712,-16.129
3D body: height 6.55, standoff 2.16, extent 0.741,-15.621 1.712,-14.859
3D body: height 6.55, standoff 2.16, extent 0.741,-14.351 1.712,-13.589
3D body: height 6.55, standoff 2.16, extent 0.741,-13.081 1.712,-12.319
3D body: height 6.55, standoff 2.16, extent 0.741,-11.811 1.712,-11.049
3D body: height 6.55, standoff 2.16, extent 0.741,-10.541 1.712,-9.779
3D body: height 6.55, standoff 2.16, extent 0.741,-9.271 1.712,-8.509
3D body: height 6.55, standoff 2.16, extent 0.741,-8.001 1.712,-7.239
3D body: height 6.55, standoff 2.16, extent 0.741,-6.731 1.712,-5.969
3D body: height 6.55, standoff 2.16, extent 0.741,-5.461 1.712,-4.699
3D body: height 6.55, standoff 2.16, extent 0.741,-4.191 1.712,-3.429
3D body: height 6.55, standoff 2.16, extent 0.741,-2.921 1.712,-2.159
3D body: height 6.55, standoff 2.16, extent 0.741,-1.651 1.712,-0.889
3D body: height 6.55, standoff 2.16, extent 0.741,-0.381 1.712,0.381
3D body: height 6.55, standoff 2.16, extent 0.741,0.889 1.712,1.651
3D body: height 6.55, standoff 2.16, extent 0.741,2.159 1.712,2.921
3D body: height 6.55, standoff 2.16, extent 0.741,3.429 1.712,4.191
3D body: height 6.55, standoff 2.16, extent 0.741,4.699 1.712,5.461
3D body: height 6.55, standoff 2.16, extent 0.741,5.969 1.712,6.731
3D body: height 6.55, standoff 2.16, extent 0.741,7.239 1.712,8.001
3D body: height 6.55, standoff 2.16, extent 0.741,8.509 1.712,9.271
3D body: height 6.55, standoff 2.16, extent 0.741,9.779 1.712,10.541
3D body: height 6.55, standoff 2.16, extent 0.741,11.049 1.712,11.811
3D body: height 6.55, standoff 2.16, extent 0.741,12.319 1.712,13.081
3D body: height 6.55, standoff 2.16, extent 0.741,13.589 1.712,14.351
3D body: height 6.55, standoff 2.16, extent 0.741,14.859 1.712,15.621
3D body: height 6.55, standoff 2.16, extent 0.741,16.129 1.712,16.891
3D body: height 6.55, standoff 2.16, extent 0.741,17.399 1.712,18.161
3D body: height 6.55, standoff 2.16, extent 0.741,18.669 1.712,19.431
3D body: height 6.55, standoff 2.16, extent 0.741,19.939 1.712,20.701
3D body: height 6.55, standoff 2.16, extent 0.741,21.209 1.712,21.971
3D body: height 6.55, standoff 2.16, extent 0.741,22.479 1.712,23.241
3D body: height 6.55, standoff 2.16, extent 0.741,23.749 1.712,24.511
3D body: height 6.55, standoff 2.16, extent 0.741,25.019 1.712,25.502
3D body: height 6.24, standoff 2.16, extent 1.157,-25.019 1.296,25.019
3D body: height 6.55, standoff 2.16, extent -1.799,-25.502 -0.828,-25.019
3D body: height 6.55, standoff 2.16, extent -1.799,-24.511 -0.828,-23.749
3D body: height 6.55, standoff 2.16, extent -1.799,-23.241 -0.828,-22.479
3D body: height 6.55, standoff 2.16, extent -1.799,-21.971 -0.828,-21.209
3D body: height 6.55, standoff 2.16, extent -1.799,-20.701 -0.828,-19.939
3D body: height 6.55, standoff 2.16, extent -1.799,-19.431 -0.828,-18.669
3D body: height 6.55, standoff 2.16, extent -1.799,-18.161 -0.828,-17.399
3D body: height 6.55, standoff 2.16, extent -1.799,-16.891 -0.828,-16.129
3D body: height 6.55, standoff 2.16, extent -1.799,-15.621 -0.828,-14.859
3D body: height 6.55, standoff 2.16, extent -1.799,-14.351 -0.828,-13.589
3D body: height 6.55, standoff 2.16, extent -1.799,-13.081 -0.828,-12.319
3D body: height 6.55, standoff 2.16, extent -1.799,-11.811 -0.828,-11.049
3D body: height 6.55, standoff 2.16, extent -1.799,-10.541 -0.828,-9.779
3D body: height 6.55, standoff 2.16, extent -1.799,-9.271 -0.828,-8.509
3D body: height 6.55, standoff 2.16, extent -1.799,-8.001 -0.828,-7.239
3D body: height 6.55, standoff 2.16, extent -1.799,-6.731 -0.828,-5.969
3D body: height 6.55, standoff 2.16, extent -1.799,-5.461 -0.828,-4.699
3D body: height 6.55, standoff 2.16, extent -1.799,-4.191 -0.828,-3.429
3D body: height 6.55, standoff 2.16, extent -1.799,-2.921 -0.828,-2.159
3D body: height 6.55, standoff 2.16, extent -1.799,-1.651 -0.828,-0.889
3D body: height 6.55, standoff 2.16, extent -1.799,-0.381 -0.828,0.381
3D body: height 6.55, standoff 2.16, extent -1.799,0.889 -0.828,1.651
3D body: height 6.55, standoff 2.16, extent -1.799,2.159 -0.828,2.921
3D body: height 6.55, standoff 2.16, extent -1.799,3.429 -0.828,4.191
3D body: height 6.55, standoff 2.16, extent -1.799,4.699 -0.828,5.461
3D body: height 6.55, standoff 2.16, extent -1.799,5.969 -0.828,6.731
3D body: height 6.55, standoff 2.16, extent -1.799,7.239 -0.828,8.001
3D body: height 6.55, standoff 2.16, extent -1.799,8.509 -0.828,9.271
3D body: height 6.55, standoff 2.16, extent -1.799,9.779 -0.828,10.541
3D body: height 6.55, standoff 2.16, extent -1.799,11.049 -0.828,11.811
3D body: height 6.55, standoff 2.16, extent -1.799,12.319 -0.828,13.081
3D body: height 6.55, standoff 2.16, extent -1.799,13.589 -0.828,14.351
3D body: height 6.55, standoff 2.16, extent -1.799,14.859 -0.828,15.621
3D body: height 6.55, standoff 2.16, extent -1.799,16.129 -0.828,16.891
3D body: height 6.55, standoff 2.16, extent -1.799,17.399 -0.828,18.161
3D body: height 6.55, standoff 2.16, extent -1.799,18.669 -0.828,19.431
3D body: height 6.55, standoff 2.16, extent -1.799,19.939 -0.828,20.701
3D body: height 6.55, standoff 2.16, extent -1.799,21.209 -0.828,21.971
3D body: height 6.55, standoff 2.16, extent -1.799,22.479 -0.828,23.241
3D body: height 6.55, standoff 2.16, extent -1.799,23.749 -0.828,24.511
3D body: height 6.55, standoff 2.16, extent -1.799,25.019 -0.828,25.502
3D body: height 6.24, standoff 2.16, extent -1.383,-25.019 -1.244,25.019
3D body: height 6.55, standoff 2.16, extent -4.339,-25.502 -3.368,-25.019
3D body: height 6.55, standoff 2.16, extent -4.339,-24.511 -3.368,-23.749
3D body: height 6.55, standoff 2.16, extent -4.339,-23.241 -3.368,-22.479
3D body: height 6.55, standoff 2.16, extent -4.339,-21.971 -3.368,-21.209
3D body: height 6.55, standoff 2.16, extent -4.339,-20.701 -3.368,-19.939
3D body: height 6.55, standoff 2.16, extent -4.339,-19.431 -3.368,-18.669
3D body: height 6.55, standoff 2.16, extent -4.339,-18.161 -3.368,-17.399
3D body: height 6.55, standoff 2.16, extent -4.339,-16.891 -3.368,-16.129
3D body: height 6.55, standoff 2.16, extent -4.339,-15.621 -3.368,-14.859
3D body: height 6.55, standoff 2.16, extent -4.339,-14.351 -3.368,-13.589
3D body: height 6.55, standoff 2.16, extent -4.339,-13.081 -3.368,-12.319
3D body: height 6.55, standoff 2.16, extent -4.339,-11.811 -3.368,-11.049
3D body: height 6.55, standoff 2.16, extent -4.339,-10.541 -3.368,-9.779
3D body: height 6.55, standoff 2.16, extent -4.339,-9.271 -3.368,-8.509
3D body: height 6.55, standoff 2.16, extent -4.339,-8.001 -3.368,-7.239
3D body: height 6.55, standoff 2.16, extent -4.339,-6.731 -3.368,-5.969
3D body: height 6.55, standoff 2.16, extent -4.339,-5.461 -3.368,-4.699
3D body: height 6.55, standoff 2.16, extent -4.339,-4.191 -3.368,-3.429
3D body: height 6.55, standoff 2.16, extent -4.339,-2.921 -3.368,-2.159
3D body: height 6.55, standoff 2.16, extent -4.339,-1.651 -3.368,-0.889
3D body: height 6.55, standoff 2.16, extent -4.339,-0.381 -3.368,0.381
3D body: height 6.55, standoff 2.16, extent -4.339,0.889 -3.368,1.651
3D body: height 6.55, standoff 2.16, extent -4.339,2.159 -3.368,2.921
3D body: height 6.55, standoff 2.16, extent -4.339,3.429 -3.368,4.191
3D body: height 6.55, standoff 2.16, extent -4.339,4.699 -3.368,5.461
3D body: height 6.55, standoff 2.16, extent -4.339,5.969 -3.368,6.731
3D body: height 6.55, standoff 2.16, extent -4.339,7.239 -3.368,8.001
3D body: height 6.55, standoff 2.16, extent -4.339,8.509 -3.368,9.271
3D body: height 6.55, standoff 2.16, extent -4.339,9.779 -3.368,10.541
3D body: height 6.55, standoff 2.16, extent -4.339,11.049 -3.368,11.811
3D body: height 6.55, standoff 2.16, extent -4.339,12.319 -3.368,13.081
3D body: height 6.55, standoff 2.16, extent -4.339,13.589 -3.368,14.351
3D body: height 6.55, standoff 2.16, extent -4.339,14.859 -3.368,15.621
3D body: height 6.55, standoff 2.16, extent -4.339,16.129 -3.368,16.891
3D body: height 6.55, standoff 2.16, extent -4.339,17.399 -3.368,18.161
3D body: height 6.55, standoff 2.16, extent -4.339,18.669 -3.368,19.431
3D body: height 6.55, standoff 2.16, extent -4.339,19.939 -3.368,20.701
3D body: height 6.55, standoff 2.16, extent -4.339,21.209 -3.368,21.971
3D body: height 6.55, standoff 2.16, extent -4.339,22.479 -3.368,23.241
3D body: height 6.55, standoff 2.16, extent -4.339,23.749 -3.368,24.511
3D body: height 6.55, standoff 2.16, extent -4.339,25.019 -3.368,25.502
3D body: height 6.24, standoff 2.16, extent -3.923,-25.019 -3.784,25.019
3D body: height 3.51, standoff 1.92, extent -6.659,-28.728 6.576,28.728
3D body: height 2, standoff -1.27, extent 2.503,26.74 3.597,27.619
3D body: height 6.55, standoff 2.16, extent 5.812,-28.727 6.577,27.891
3D body: height 6.55, standoff 2.16, extent -6.662,-28.727 -5.897,27.89

## FMC_HPC_female_conn [mm] "WRONG NAME. DO NOT USE"
pads (404):
  round 0.9 smd: A1(5.715,-24.765) A2(5.715,-23.495) A3(5.715,-22.225) A4(5.715,-20.955) A5(5.715,-19.685) A6(5.715,-18.415) A7(5.715,-17.145) A8(5.715,-15.875) A9(5.715,-14.605) A10(5.715,-13.335) A11(5.715,-12.065) A12(5.715,-10.795) A13(5.715,-9.525) A14(5.715,-8.255) A15(5.715,-6.985) A16(5.715,-5.715) A17(5.715,-4.445) A18(5.715,-3.175) A19(5.715,-1.905) A20(5.715,-0.635) A21(5.715,0.635) A22(5.715,1.905) A23(5.715,3.175) A24(5.715,4.445) A25(5.715,5.715) A26(5.715,6.985) A27(5.715,8.255) A28(5.715,9.525) A29(5.715,10.795) A30(5.715,12.065) A31(5.715,13.335) A32(5.715,14.605) A33(5.715,15.875) A34(5.715,17.145) A35(5.715,18.415) A36(5.715,19.685) A37(5.715,20.955) A38(5.715,22.225) A39(5.715,23.495) A40(5.715,24.765) B1(4.445,-24.765) B2(4.445,-23.495) B3(4.445,-22.225) B4(4.445,-20.955) B5(4.445,-19.685) B6(4.445,-18.415) B7(4.445,-17.145) B8(4.445,-15.875) B9(4.445,-14.605) B10(4.445,-13.335) B11(4.445,-12.065) B12(4.445,-10.795) B13(4.445,-9.525) B14(4.445,-8.255) B15(4.445,-6.985) B16(4.445,-5.715) B17(4.445,-4.445) B18(4.445,-3.175) B19(4.445,-1.905) B20(4.445,-0.635) B21(4.445,0.635) B22(4.445,1.905) B23(4.445,3.175) B24(4.445,4.445) B25(4.445,5.715) B26(4.445,6.985) B27(4.445,8.255) B28(4.445,9.525) B29(4.445,10.795) B30(4.445,12.065) B31(4.445,13.335) B32(4.445,14.605) B33(4.445,15.875) B34(4.445,17.145) B35(4.445,18.415) B36(4.445,19.685) B37(4.445,20.955) B38(4.445,22.225) B39(4.445,23.495) B40(4.445,24.765) C1(3.175,-24.765) C2(3.175,-23.495) C3(3.175,-22.225) C4(3.175,-20.955) C5(3.175,-19.685) C6(3.175,-18.415) C7(3.175,-17.145) C8(3.175,-15.875) C9(3.175,-14.605) C10(3.175,-13.335) C11(3.175,-12.065) C12(3.175,-10.795) C13(3.175,-9.525) C14(3.175,-8.255) C15(3.175,-6.985) C16(3.175,-5.715) C17(3.175,-4.445) C18(3.175,-3.175) C19(3.175,-1.905) C20(3.175,-0.635) C21(3.175,0.635) C22(3.175,1.905) C23(3.175,3.175) C24(3.175,4.445) C25(3.175,5.715) C26(3.175,6.985) C27(3.175,8.255) C28(3.175,9.525) C29(3.175,10.795) C30(3.175,12.065) C31(3.175,13.335) C32(3.175,14.605) C33(3.175,15.875) C34(3.175,17.145) C35(3.175,18.415) C36(3.175,19.685) C37(3.175,20.955) C38(3.175,22.225) C39(3.175,23.495) C40(3.175,24.765) D1(1.905,-24.765) D2(1.905,-23.495) D3(1.905,-22.225) D4(1.905,-20.955) D5(1.905,-19.685) D6(1.905,-18.415) D7(1.905,-17.145) D8(1.905,-15.875) D9(1.905,-14.605) D10(1.905,-13.335) D11(1.905,-12.065) D12(1.905,-10.795) D13(1.905,-9.525) D14(1.905,-8.255) D15(1.905,-6.985) D16(1.905,-5.715) D17(1.905,-4.445) D18(1.905,-3.175) D19(1.905,-1.905) D20(1.905,-0.635) D21(1.905,0.635) D22(1.905,1.905) D23(1.905,3.175) D24(1.905,4.445) D25(1.905,5.715) D26(1.905,6.985) D27(1.905,8.255) D28(1.905,9.525) D29(1.905,10.795) D30(1.905,12.065) D31(1.905,13.335) D32(1.905,14.605) D33(1.905,15.875) D34(1.905,17.145) D35(1.905,18.415) D36(1.905,19.685) D37(1.905,20.955) D38(1.905,22.225) D39(1.905,23.495) D40(1.905,24.765) E1(0.635,-24.765) E2(0.635,-23.495) E3(0.635,-22.225) E4(0.635,-20.955) E5(0.635,-19.685) E6(0.635,-18.415) E7(0.635,-17.145) E8(0.635,-15.875) E9(0.635,-14.605) E10(0.635,-13.335) E11(0.635,-12.065) E12(0.635,-10.795) E13(0.635,-9.525) E14(0.635,-8.255) E15(0.635,-6.985) E16(0.635,-5.715) E17(0.635,-4.445) E18(0.635,-3.175) E19(0.635,-1.905) E20(0.635,-0.635) E21(0.635,0.635) E22(0.635,1.905) E23(0.635,3.175) E24(0.635,4.445) E25(0.635,5.715) E26(0.635,6.985) E27(0.635,8.255) E28(0.635,9.525) E29(0.635,10.795) E30(0.635,12.065) E31(0.635,13.335) E32(0.635,14.605) E33(0.635,15.875) E34(0.635,17.145) E35(0.635,18.415) E36(0.635,19.685) E37(0.635,20.955) E38(0.635,22.225) E39(0.635,23.495) E40(0.635,24.765) F1(-0.635,-24.765) F2(-0.635,-23.495) F3(-0.635,-22.225) F4(-0.635,-20.955) F5(-0.635,-19.685) F6(-0.635,-18.415) F7(-0.635,-17.145) F8(-0.635,-15.875) F9(-0.635,-14.605) F10(-0.635,-13.335) F11(-0.635,-12.065) F12(-0.635,-10.795) F13(-0.635,-9.525) F14(-0.635,-8.255) F15(-0.635,-6.985) F16(-0.635,-5.715) F17(-0.635,-4.445) F18(-0.635,-3.175) F19(-0.635,-1.905) F20(-0.635,-0.635) F21(-0.635,0.635) F22(-0.635,1.905) F23(-0.635,3.175) F24(-0.635,4.445) F25(-0.635,5.715) F26(-0.635,6.985) F27(-0.635,8.255) F28(-0.635,9.525) F29(-0.635,10.795) F30(-0.635,12.065) F31(-0.635,13.335) F32(-0.635,14.605) F33(-0.635,15.875) F34(-0.635,17.145) F35(-0.635,18.415) F36(-0.635,19.685) F37(-0.635,20.955) F38(-0.635,22.225) F39(-0.635,23.495) F40(-0.635,24.765) G1(-1.905,-24.765) G2(-1.905,-23.495) G3(-1.905,-22.225) G4(-1.905,-20.955) G5(-1.905,-19.685) G6(-1.905,-18.415) G7(-1.905,-17.145) G8(-1.905,-15.875) G9(-1.905,-14.605) G10(-1.905,-13.335) G11(-1.905,-12.065) G12(-1.905,-10.795) G13(-1.905,-9.525) G14(-1.905,-8.255) G15(-1.905,-6.985) G16(-1.905,-5.715) G17(-1.905,-4.445) G18(-1.905,-3.175) G19(-1.905,-1.905) G20(-1.905,-0.635) G21(-1.905,0.635) G22(-1.905,1.905) G23(-1.905,3.175) G24(-1.905,4.445) G25(-1.905,5.715) G26(-1.905,6.985) G27(-1.905,8.255) G28(-1.905,9.525) G29(-1.905,10.795) G30(-1.905,12.065) G31(-1.905,13.335) G32(-1.905,14.605) G33(-1.905,15.875) G34(-1.905,17.145) G35(-1.905,18.415) G36(-1.905,19.685) G37(-1.905,20.955) G38(-1.905,22.225) G39(-1.905,23.495) G40(-1.905,24.765) H1(-3.175,-24.765) H2(-3.175,-23.495) H3(-3.175,-22.225) H4(-3.175,-20.955) H5(-3.175,-19.685) H6(-3.175,-18.415) H7(-3.175,-17.145) H8(-3.175,-15.875) H9(-3.175,-14.605) H10(-3.175,-13.335) H11(-3.175,-12.065) H12(-3.175,-10.795) H13(-3.175,-9.525) H14(-3.175,-8.255) H15(-3.175,-6.985) H16(-3.175,-5.715) H17(-3.175,-4.445) H18(-3.175,-3.175) H19(-3.175,-1.905) H20(-3.175,-0.635) H21(-3.175,0.635) H22(-3.175,1.905) H23(-3.175,3.175) H24(-3.175,4.445) H25(-3.175,5.715) H26(-3.175,6.985) H27(-3.175,8.255) H28(-3.175,9.525) H29(-3.175,10.795) H30(-3.175,12.065) H31(-3.175,13.335) H32(-3.175,14.605) H33(-3.175,15.875) H34(-3.175,17.145) H35(-3.175,18.415) H36(-3.175,19.685) H37(-3.175,20.955) H38(-3.175,22.225) H39(-3.175,23.495) H40(-3.175,24.765) J1(-4.445,-24.765) J2(-4.445,-23.495) J3(-4.445,-22.225) J4(-4.445,-20.955) J5(-4.445,-19.685) J6(-4.445,-18.415) J7(-4.445,-17.145) J8(-4.445,-15.875) J9(-4.445,-14.605) J10(-4.445,-13.335) J11(-4.445,-12.065) J12(-4.445,-10.795) J13(-4.445,-9.525) J14(-4.445,-8.255) J15(-4.445,-6.985) J16(-4.445,-5.715) J17(-4.445,-4.445) J18(-4.445,-3.175) J19(-4.445,-1.905) J20(-4.445,-0.635) J21(-4.445,0.635) J22(-4.445,1.905) J23(-4.445,3.175) J24(-4.445,4.445) J25(-4.445,5.715) J26(-4.445,6.985) J27(-4.445,8.255) J28(-4.445,9.525) J29(-4.445,10.795) J30(-4.445,12.065) J31(-4.445,13.335) J32(-4.445,14.605) J33(-4.445,15.875) J34(-4.445,17.145) J35(-4.445,18.415) J36(-4.445,19.685) J37(-4.445,20.955) J38(-4.445,22.225) J39(-4.445,23.495) J40(-4.445,24.765) K1(-5.715,-24.765) K2(-5.715,-23.495) K3(-5.715,-22.225) K4(-5.715,-20.955) K5(-5.715,-19.685) K6(-5.715,-18.415) K7(-5.715,-17.145) K8(-5.715,-15.875) K9(-5.715,-14.605) K10(-5.715,-13.335) K11(-5.715,-12.065) K12(-5.715,-10.795) K13(-5.715,-9.525) K14(-5.715,-8.255) K15(-5.715,-6.985) K16(-5.715,-5.715) K17(-5.715,-4.445) K18(-5.715,-3.175) K19(-5.715,-1.905) K20(-5.715,-0.635) K21(-5.715,0.635) K22(-5.715,1.905) K23(-5.715,3.175) K24(-5.715,4.445) K25(-5.715,5.715) K26(-5.715,6.985) K27(-5.715,8.255) K28(-5.715,9.525) K29(-5.715,10.795) K30(-5.715,12.065) K31(-5.715,13.335) K32(-5.715,14.605) K33(-5.715,15.875) K34(-5.715,17.145) K35(-5.715,18.415) K36(-5.715,19.685) K37(-5.715,20.955) K38(-5.715,22.225) K39(-5.715,23.495) K40(-5.715,24.765)
  round 3.2 hole 2.7: MH1(-1.98,-31.5) MH2(-1.98,31.5)
  round 0.97 hole 1.27 unplated: MH1(0,-27.18) MH2(-3.05,27.18)
Top Layer keep-out:
  region: -1.98,28.6 -2.17,28.6 -2.547,28.65 -2.914,28.748 -3.265,28.893 -3.595,29.084 -3.896,29.315 -4.165,29.584 -4.396,29.885 -4.587,30.215 -4.732,30.566 -4.83,30.933 -4.88,31.31 -4.88,31.5 -4.88,31.69 -4.83,32.067 -4.732,32.434 -4.587,32.785 -4.396,33.115 -4.165,33.416 -3.896,33.685 -3.595,33.916 -3.265,34.107 -2.914,34.252 -2.547,34.35 -2.17,34.4 -1.98,34.4 -1.79,34.4 -1.413,34.35 -1.046,34.252 -0.695,34.107 -0.365,33.916 -0.064,33.685 0.205,33.416 0.436,33.115 0.627,32.785 0.772,32.434 0.87,32.067 0.92,31.69 0.92,31.5 0.92,31.31 0.87,30.933 0.772,30.566 0.627,30.215 0.436,29.885 0.205,29.584 -0.064,29.315 -0.365,29.084 -0.695,28.893 -1.046,28.748 -1.413,28.65 -1.79,28.6
  region: -1.98,-34.4 -2.17,-34.4 -2.547,-34.35 -2.914,-34.252 -3.265,-34.107 -3.595,-33.916 -3.896,-33.685 -4.165,-33.416 -4.396,-33.115 -4.587,-32.785 -4.732,-32.434 -4.83,-32.067 -4.88,-31.69 -4.88,-31.5 -4.88,-31.31 -4.83,-30.933 -4.732,-30.566 -4.587,-30.215 -4.396,-29.885 -4.165,-29.584 -3.896,-29.315 -3.595,-29.084 -3.265,-28.893 -2.914,-28.748 -2.547,-28.65 -2.17,-28.6 -1.98,-28.6 -1.79,-28.6 -1.413,-28.65 -1.046,-28.748 -0.695,-28.893 -0.365,-29.084 -0.064,-29.315 0.205,-29.584 0.436,-29.885 0.627,-30.215 0.772,-30.566 0.87,-30.933 0.92,-31.31 0.92,-31.5 0.92,-31.69 0.87,-32.067 0.772,-32.434 0.627,-32.785 0.436,-33.115 0.205,-33.416 -0.064,-33.685 -0.365,-33.916 -0.695,-34.107 -1.046,-34.252 -1.413,-34.35 -1.79,-34.4
Top Overlay:
  lines w0.2: -6.662,-27.89 -6.662,28.727 ; -6.66,-27.889 -0.5,-27.889 -0.5,-28.727 0.5,-28.727 0.5,-27.9 0.511,-27.889 4,-27.889 6.573,-27.889 6.573,28.727 ; -6.66,28.727 2.153,28.727 6.574,28.727
  text "K" at -5.45,29.475 h1.1
  text "A" at 5.85,29.45 h1.1
  text "1" at -7.5,-25 h1.1
  text "40" at -7.6,23.7 h1.1
Mechanical 15:
  lines w0.15: -0.5,0 0.5,0 ; 0,-0.5 0,0.5 ; -6.862,-28.089 -6.862,28.927 -2.041,28.927 1.953,28.927 6.773,28.927 6.773,-28.089 0.5,-28.089 0.5,-28.927 -0.5,-28.927 -0.5,-28.089 -6.862,-28.089
  text ".Designator" at 0,0 h0.55
  text "A1" at 6.325,-30.075 h1.1
  text "K1" at -5.25,-30.05 h1.1
  text "K40" at -5.3,29.225 h1.1
  text "A40" at 6.275,29.2 h1.1
3D body "ASP-134602-01.stp": height 5.76, standoff -1.12, extent -7.341,-28.775 7.341,27.892